# Altium footprint library FootPrintLib_12.PcbLib: 319 footprints (part 4 of 20)
Each footprint in its own frame and in the unit in brackets; x right, y up, seen from the top. Pads: shape width x height; smd on the part's side, far side on the other; paste and mask are expansions set on the pad; w line width, h text height; cw(c..) or ccw(c..) is an arc to the next point about the centre after c.
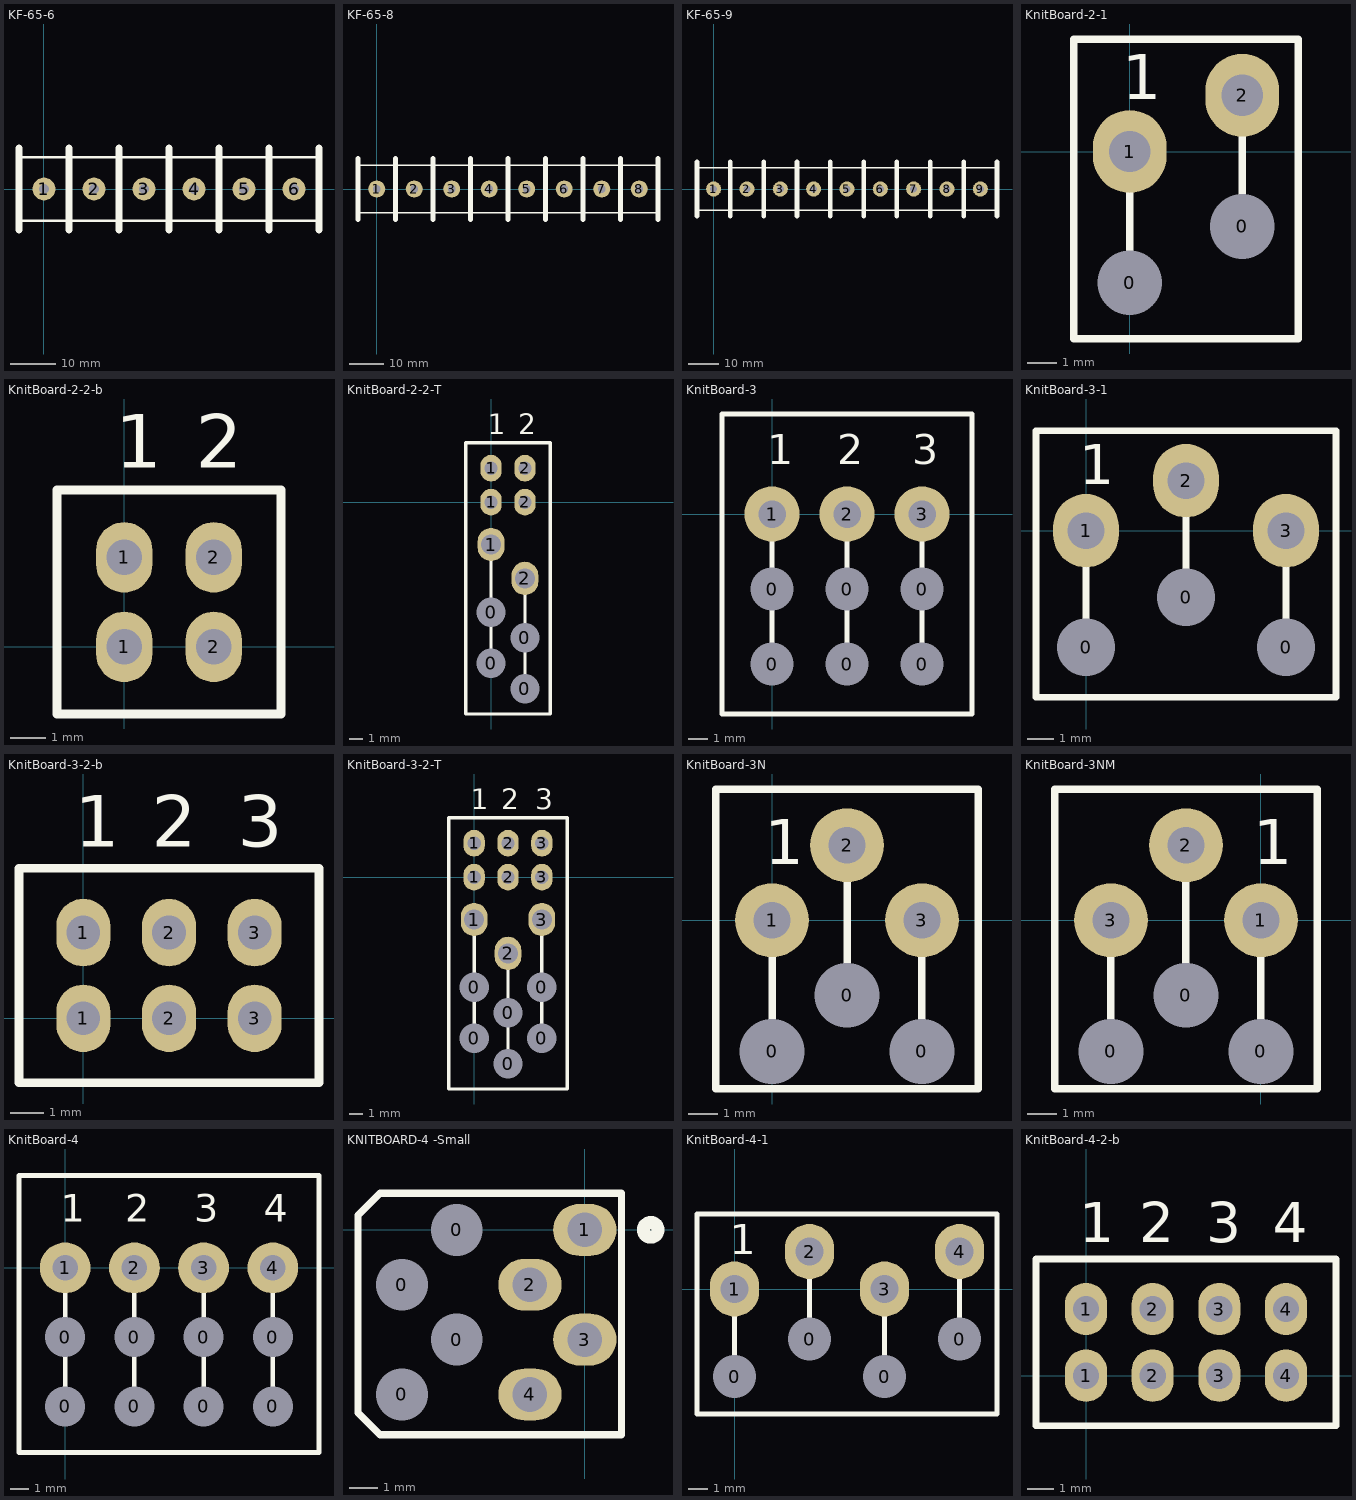
[diagram p3: the footprints below, top view; thin cyan lines are the x and y axes]

## KF-65-6 [mm]
pads (6):
  round 5 hole 2.3: 1(0,0) 2(11,0) 3(22,0) 4(33,0) 5(44,0) 6(55,0)
Top Overlay:
  lines w0.508: -5.5,-7 60.5,-7 ; -5.5,7 60.5,7
  lines w1.5: -5.5,-9 -5.5,9 ; 5.5,-9 5.5,9 ; 16.5,-9 16.5,9 ; 27.5,-9 27.5,9 ; 38.5,-9 38.5,9 ; 49.5,-9 49.5,9 ; 60.5,-9 60.5,9

## KF-65-8 [mm]
pads (8):
  round 5 hole 2.3: 1(0,0) 2(11,0) 3(22,0) 4(33,0) 5(44,0) 6(55,0) 7(66.02,0) 8(77.02,0)
Top Overlay:
  lines w0.508: -5.5,-7 82.49,-7 ; -5.5,7 82.49,7
  lines w1.5: -5.5,-9 -5.5,9 ; 5.5,-9 5.5,9 ; 16.5,-9 16.5,9 ; 27.5,-9 27.5,9 ; 38.5,-9 38.5,9 ; 49.5,-9 49.5,9 ; 60.5,-9 60.5,9 ; 71.52,-9 71.52,9 ; 82.52,-9 82.52,9

## KF-65-9 [mm]
pads (9):
  round 5 hole 2.3: 1(0,0) 2(11,0) 3(22,0) 4(33,0) 5(44,0) 6(55,0) 7(66.02,0) 8(77.02,0) 9(88.02,0)
Top Overlay:
  lines w0.508: -5.5,-7 93.345,-7 ; -5.5,7 93.345,7
  lines w1.5: -5.5,-9 -5.5,9 ; 5.5,-9 5.5,9 ; 16.5,-9 16.5,9 ; 27.5,-9 27.5,9 ; 38.5,-9 38.5,9 ; 49.5,-9 49.5,9 ; 60.5,-9 60.5,9 ; 71.52,-9 71.52,9 ; 82.52,-9 82.52,9 ; 93.52,-9 93.52,9

## KnitBoard-2-1 [mm]
pads (4):
  round 2 hole 2.2: 0(0,-4.445) 0(3.81,-2.54)
  oval 2.5x2.8 hole 1.4: 1(0,0) 2(3.81,1.905)
Top Overlay:
  lines w0.254: 0,-4.445 0,0 ; 3.81,-2.54 3.81,1.905 ; -1.905,-6.35 -1.905,3.81 5.715,3.81 5.715,-6.35 -1.905,-6.35
  text "1" at -0.254,1.778 h1.52

## KnitBoard-2-2-b [mm]
pads (4):
  oval 1.6x2 hole 1: 1(0,0) 1(0,2.54) 2(2.54,0) 2(2.54,2.54)
Top Overlay:
  lines w0.254: -1.905,-1.905 4.445,-1.905 4.445,4.445 -1.905,4.445 -1.905,-1.905
  text "2" at 2.032,5.08 h1.52
  text "1" at -0.254,5.08 h1.52

## KnitBoard-2-2-T [mm]
pads (10):
  round 2 hole 2.2: 0(0,-12.065) 0(0,-8.255) 0(2.54,-13.97) 0(2.54,-10.16)
  oval 2x2.5 hole 1.5: 1(0,-3.175) 2(2.54,-5.715)
  oval 1.6x2 hole 1: 1(0,0) 1(0,2.54) 2(2.54,0) 2(2.54,2.54)
Top Overlay:
  lines w0.254: 0,-12.065 0,-3.175 ; 2.54,-13.97 2.54,-5.715 ; -1.905,-15.875 -1.905,4.445 4.445,4.445 4.445,-15.875 -1.905,-15.875
  text "1" at -0.254,5.08 h1.52
  text "2" at 2.032,5.08 h1.52

## KnitBoard-3 [mm]
pads (9):
  round 2 hole 2.2: 0(0,-7.62) 0(0,-3.81) 0(3.81,-7.62) 0(3.81,-3.81) 0(7.62,-7.62) 0(7.62,-3.81)
  round 2.794 hole 1.397: 1(0,0) 2(3.81,0) 3(7.62,0)
Top Overlay:
  lines w0.254: 0,-7.62 0,0 ; 3.81,-7.62 3.81,0 ; 7.62,-7.62 7.62,0 ; -2.54,-10.16 10.16,-10.16 10.16,5.08 -2.54,5.08 -2.54,-10.16
  text "3" at 7.112,2.54 h1.52
  text "2" at 3.302,2.54 h1.52
  text "1" at -0.254,2.54 h1.52

## KnitBoard-3-1 [mm]
pads (6):
  round 2 hole 2.2: 0(0,-4.445) 0(3.81,-2.54) 0(7.62,-4.445)
  oval 2.5x2.8 hole 1.4: 1(0,0) 2(3.81,1.905) 3(7.62,0)
Top Overlay:
  lines w0.254: 0,-4.445 0,0 ; 3.81,-2.54 3.81,1.905 ; 7.62,-4.445 7.62,0 ; -1.905,-6.35 -1.905,3.81 9.525,3.81 9.525,-6.35 -1.905,-6.35
  text "1" at -0.254,1.778 h1.52

## KnitBoard-3-2-b [mm]
pads (6):
  oval 1.6x2 hole 1: 1(0,0) 1(0,2.54) 2(2.54,0) 2(2.54,2.54) 3(5.08,0) 3(5.08,2.54)
Top Overlay:
  lines w0.254: -1.905,-1.905 6.985,-1.905 6.985,4.445 -1.905,4.445 -1.905,-1.905
  text "3" at 4.572,5.08 h1.52
  text "2" at 2.032,5.08 h1.52
  text "1" at -0.254,5.08 h1.52

## KnitBoard-3-2-T [mm]
pads (15):
  round 2 hole 2.2: 0(0,-12.065) 0(0,-8.255) 0(2.54,-13.97) 0(2.54,-10.16) 0(5.08,-12.065) 0(5.08,-8.255)
  oval 2x2.5 hole 1.5: 1(0,-3.175) 2(2.54,-5.715) 3(5.08,-3.175)
  oval 1.6x2 hole 1: 1(0,0) 1(0,2.54) 2(2.54,0) 2(2.54,2.54) 3(5.08,0) 3(5.08,2.54)
Top Overlay:
  lines w0.254: 0,-12.065 0,-3.175 ; 2.54,-13.97 2.54,-5.715 ; 5.08,-12.065 5.08,-3.175 ; -1.905,-15.875 6.985,-15.875 6.985,4.445 -1.905,4.445 -1.905,-15.875
  text "3" at 4.572,5.08 h1.52
  text "2" at 2.032,5.08 h1.52
  text "1" at -0.254,5.08 h1.52

## KnitBoard-3N [mm]
pads (6):
  round 2 hole 2.2: 0(0,-4.445) 0(2.54,-2.54) 0(5.08,-4.445)
  round 2.5 hole 1.25: 1(0,0) 2(2.54,2.54) 3(5.08,0)
Top Overlay:
  lines w0.254: 0,-5.08 0,0 ; 2.54,-3.175 2.54,2.54 ; 5.08,-5.08 5.08,0 ; -1.905,-5.715 6.985,-5.715 6.985,4.445 -1.905,4.445 -1.905,-5.715
  text "1" at -0.254,1.905 h1.52

## KnitBoard-3NM [mm]
pads (6):
  round 2 hole 2.2: 0(-5.08,-4.445) 0(-2.54,-2.54) 0(0,-4.445)
  round 2.5 hole 1.25: 1(0,0) 2(-2.54,2.54) 3(-5.08,0)
Top Overlay:
  lines w0.254: -5.08,-5.08 -5.08,0 ; -2.54,-3.175 -2.54,2.54 ; 0,-5.08 0,0 ; -6.985,-5.715 -6.985,4.445 1.905,4.445 1.905,-5.715 -6.985,-5.715
  text "1" at -0.254,1.905 h1.52

## KnitBoard-4 [mm]
pads (12):
  round 2 hole 2.2: 0(0,-7.62) 0(0,-3.81) 0(3.81,-7.62) 0(3.81,-3.81) 0(7.62,-7.62) 0(7.62,-3.81) 0(11.43,-7.62) 0(11.43,-3.81)
  round 2.794 hole 1.397: 1(0,0) 2(3.81,0) 3(7.62,0) 4(11.43,0)
Top Overlay:
  lines w0.254: 0,-7.62 0,0 ; 3.81,-7.62 3.81,0 ; 7.62,-7.62 7.62,0 ; 11.43,-7.62 11.43,0 ; -2.54,-10.16 -2.54,5.08 13.97,5.08 13.97,-10.16 -2.54,-10.16
  text "1" at -0.254,2.54 h1.52
  text "2" at 3.302,2.54 h1.52
  text "3" at 7.112,2.54 h1.52
  text "4" at 10.922,2.54 h1.52

## KNITBOARD-4 -Small [mm] "p?"
pads (8):
  round 1.5 hole 1.8: 0(-6.35,-5.715) 0(-6.35,-1.905) 0(-4.445,-3.81) 0(-4.445,0)
  oval 2.2x1.8 hole 1.2: 1(0,0) 2(-1.905,-1.905) 3(0,-3.81) 4(-1.905,-5.715)
Top Overlay:
  circle w0.454: c2.286,0 r0.254
  lines w0.254: -7.874,-6.35 -7.874,0.508 -7.112,1.27 1.27,1.27 1.27,-7.112 -7.112,-7.112 -7.874,-6.35

## KnitBoard-4-1 [mm]
pads (8):
  round 2 hole 2.2: 0(0,-4.445) 0(3.81,-2.54) 0(7.62,-4.445) 0(11.43,-2.54)
  oval 2.5x2.8 hole 1.4: 1(0,0) 2(3.81,1.905) 3(7.62,0) 4(11.43,1.905)
Top Overlay:
  lines w0.254: 0,-4.445 0,0 ; 3.81,-2.54 3.81,1.905 ; 7.62,-4.445 7.62,0 ; 11.43,-2.54 11.43,1.905 ; -1.905,-6.35 13.335,-6.35 13.335,3.81 -1.905,3.81 -1.905,-6.35
  text "1" at -0.254,1.778 h1.52

## KnitBoard-4-2-b [mm]
pads (8):
  oval 1.6x2 hole 1: 1(0,0) 1(0,2.54) 2(2.54,0) 2(2.54,2.54) 3(5.08,0) 3(5.08,2.54) 4(7.62,0) 4(7.62,2.54)
Top Overlay:
  lines w0.254: -1.905,-1.905 -1.905,4.445 9.525,4.445 9.525,-1.905 -1.905,-1.905
  text "1" at -0.254,5.08 h1.52
  text "2" at 2.032,5.08 h1.52
  text "3" at 4.572,5.08 h1.52
  text "4" at 7.112,5.08 h1.52